# Altium footprint library 调理电路板.PcbLib: 25 footprints (part 2 of 2)
Each footprint in its own frame and in the unit in brackets; x right, y up, seen from the top. Pads: shape width x height; smd on the part's side, far side on the other; paste and mask are expansions set on the pad; w line width, h text height; cw(c..) or ccw(c..) is an arc to the next point about the centre after c.
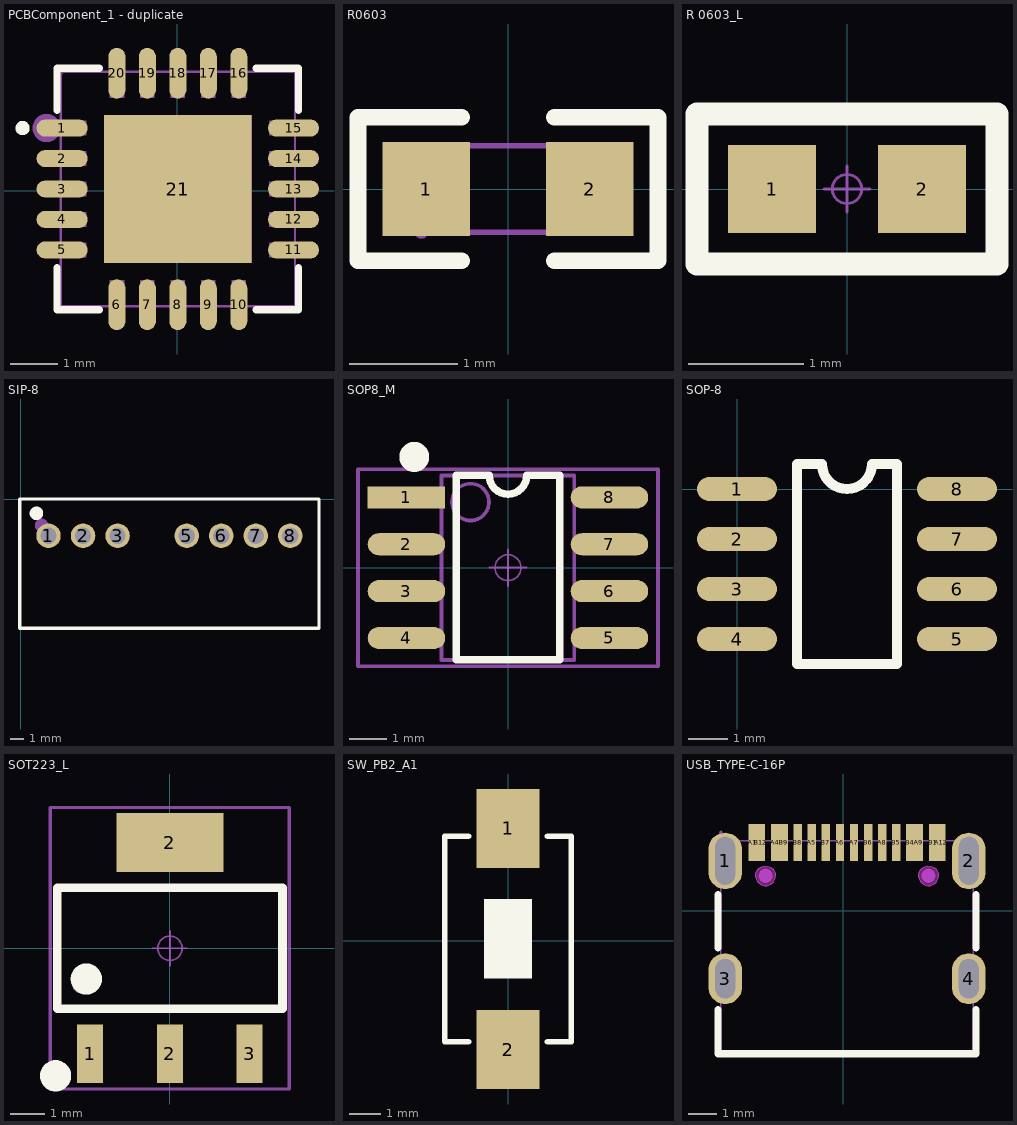
[diagram p1: the footprints below, top view; thin cyan lines are the x and y axes]

## PCBComponent_1 - duplicate [mil]
pads (21):
  oval 42.8x14.3 smd paste-3937 mask+2: 1(-96.6,52.7) 2(-96.6,27.1) 3(-96.6,1.5) 4(-96.6,-24.1) 5(-96.6,-49.7) 11(97.8,-49.7) 12(97.8,-24.1) 13(97.8,1.5) 14(97.8,27.1) 15(97.8,52.7)
  oval 14.3x42.8 smd paste-3937 mask+2: 6(-50.6,-95.7) 7(-25,-95.7) 8(0.6,-95.7) 9(26.2,-95.7) 10(51.8,-95.7) 16(51.8,98.7) 17(26.2,98.7) 18(0.6,98.7) 19(-25,98.7) 20(-50.6,98.7)
  rect 124x124 smd paste-3937 mask+2: 21(0.6,1.5)
Top Overlay:
  lines w6: -100.8,-64.3 -100.8,-99.9 -65.3,-99.9 ; -100.8,67.4 -100.8,102.9 -65.3,102.9 ; 66.4,-99.9 102,-99.9 102,-64.3 ; 66.4,102.9 102,102.9 102,67.4 ; -132.8,52.7 ccw(c-129.8,52.7) -126.8,52.7 ccw(c-129.8,52.7) -132.8,52.7
Top Paste:
  drawing of 21 lines, arcs and shapes, not listed
Mechanical 16:
  region: -49,63.5 62.6,63.5 62.6,-60.5 -61.4,-60.5 -61.4,51.1
  region: -56.6,78.3 -44.6,78.3 -44.6,99.9 -56.6,99.9
  region: -31,78.3 -19,78.3 -19,99.9 -31,99.9
  region: -5.4,78.3 6.6,78.3 6.6,99.9 -5.4,99.9
  region: 20.2,78.3 32.2,78.3 32.2,99.9 20.2,99.9
  region: 45.8,78.3 57.8,78.3 57.8,99.9 45.8,99.9
  region: 99,58.7 77.4,58.7 77.4,46.7 99,46.7
  region: 99,33.1 77.4,33.1 77.4,21.1 99,21.1
  region: 99,7.5 77.4,7.5 77.4,-4.5 99,-4.5
  region: 99,-18.1 77.4,-18.1 77.4,-30.1 99,-30.1
  region: 99,-43.7 77.4,-43.7 77.4,-55.7 99,-55.7
  region: 45.8,-75.3 57.8,-75.3 57.8,-96.9 45.8,-96.9
  region: 20.2,-75.3 32.2,-75.3 32.2,-96.9 20.2,-96.9
  region: -5.4,-75.3 6.6,-75.3 6.6,-96.9 -5.4,-96.9
  region: -31,-75.3 -19,-75.3 -19,-96.9 -31,-96.9
  region: -56.6,-75.3 -44.6,-75.3 -44.6,-96.9 -56.6,-96.9
  region: -97.8,-43.7 -76.2,-43.7 -76.2,-55.7 -97.8,-55.7
  region: -97.8,-18.1 -76.2,-18.1 -76.2,-30.1 -97.8,-30.1
  region: -97.8,7.5 -76.2,7.5 -76.2,-4.5 -97.8,-4.5
  region: -97.8,33.1 -76.2,33.1 -76.2,21.1 -97.8,21.1
  region: -97.8,58.7 -76.2,58.7 -76.2,46.7 -97.8,46.7
  region: -95.5,99.9 -95.5,99 -96.9,97.6 -98.8,97.6 -100.2,99 -100.2,99.9 -100.2,100.9 -98.8,102.3 -96.9,102.3 -95.5,100.9
  lines w2: -97.8,-96.9 -97.8,99.9 99,99.9 99,-96.9 -97.8,-96.9
  lines w11.8: -115.6,52.7 ccw(c-109.7,52.7) -103.8,52.7 ccw(c-109.7,52.7) -115.6,52.7

## R0603 [mil]
pads (2):
  rect 31.8x34 smd paste-3937 mask+2: 1(-29.7,0) 2(29.7,0)
Top Overlay:
  lines w6: -16.8,-26 -54.5,-26 -54.5,26 -16.8,26 ; 16.8,-26 54.5,-26 54.5,26 16.8,26
Top Paste:
  region: -47,-17.7 -15.6,-17.7 -13.6,-15.7 -13.6,-6.8 -28.2,-6.8 -28.2,6.2 -13.6,6.2 -13.6,15.7 -15.6,17.7 -47,17.7 -49,15.7 -49,-15.7
  region: 47,17.7 15.6,17.7 13.6,15.7 13.6,6.8 28.1,6.8 28.1,-6.2 13.6,-6.2 13.6,-15.7 15.6,-17.7 47,-17.7 49,-15.7 49,15.7
Mechanical 16:
  region: 31.5,-15.7 31.5,15.7 19.7,15.7 19.7,-15.7
  region: -31.5,-15.7 -31.5,15.7 -19.7,15.7 -19.7,-15.7
  region: -29.1,-15.8 -29.5,-17 -30.5,-17.9 -31.8,-18.1 -33,-17.5 -33.8,-16.4 -33.8,-15.1 -33,-14 -31.8,-13.4 -30.5,-13.6 -29.5,-14.5
  lines w2: -31.5,-15.7 31.5,-15.7 31.5,15.7 -31.5,15.7 -31.5,-15.7

## R 0603_L [mil]
pads (2):
  rect 30x30 smd: 1(-25.6,0) 2(25.6,0)
Top Overlay:
  lines w8: -51.2,-25.6 -51.2,25.6 51.2,25.6 51.2,-25.6 -51.2,-25.6
Mechanical 16:
  lines w1: -7.9,0 7.9,0 ; 0,-7.9 0,7.9 ; -5,0 ccw(c0,0) 5,0 ccw(c0,0) -5,0

## SIP-8 [mil]
pads (7):
  round 70.9 hole 47.2: 1(80.4,-104.9) 2(180.4,-104.9) 3(280.4,-104.9) 5(480.4,-104.9) 6(580.4,-104.9) 7(680.4,-104.9) 8(780.4,-104.9)
Top Overlay:
  lines w10: -2.7,-372.6 863.5,-372.6 863.5,1.4 -2.7,1.4 -2.7,-372.6
  lines w19.7: 35.6,-39.9 ccw(c45.4,-39.9) 55.2,-39.9 ccw(c45.4,-39.9) 35.6,-39.9
Mechanical 16:
  region: 766.6,-99 794.2,-99 794.2,-110.8 766.6,-110.8
  region: 666.6,-99 694.2,-99 694.2,-110.8 666.6,-110.8
  region: 566.6,-99 594.2,-99 594.2,-110.8 566.6,-110.8
  region: 466.6,-99 494.2,-99 494.2,-110.8 466.6,-110.8
  region: 266.6,-99 294.2,-99 294.2,-110.8 266.6,-110.8
  region: 166.6,-99 194.2,-99 194.2,-110.8 166.6,-110.8
  region: 66.6,-99 94.2,-99 94.2,-110.8 66.6,-110.8
  region: -0.3,-372.6 -0.3,-373.6 -1.7,-375 -3.6,-375 -5,-373.6 -5,-372.6 -5,-371.6 -3.6,-370.3 -1.7,-370.3 -0.3,-371.6
  lines w2: -2.7,-372.6 863.5,-372.6 863.5,1.4 -2.7,1.4 -2.7,-372.6
  lines w19.7: 50.6,-74.9 ccw(c60.4,-74.9) 70.2,-74.9 ccw(c60.4,-74.9) 50.6,-74.9

## SOP8_M [mil]
pads (8):
  rect 82.7x23.6 smd: 1(-108.3,75)
  oval 82.7x23.6 smd: 2(-108.3,25) 3(-108.3,-25) 4(-108.3,-75) 5(108.2,-75) 6(108.2,-25) 7(108.2,25) 8(108.2,75)
Top Overlay:
  lines w7.9: -55,98.4 -55,-98.4 55,-98.4 55,98.4
  lines w8: -55,98.4 -20,98.4 -19.6,94.5 -18.5,90.8 -16.7,87.3 -14.2,84.3 -11.1,81.8 -7.7,79.9 -3.9,78.8 0,78.4 3.9,78.8 7.6,79.9 11.1,81.8 14.1,84.3 16.6,87.3 18.4,90.8 19.6,94.5 20,98.4 55,98.4
  lines w19.7: -106.1,118.1 ccw(c-100,118.1) -93.9,118.1 ccw(c-100,118.1) -106.1,118.1
Mechanical 16:
  lines w2: -19.7,0 19.7,0 ; 0,-19.7 0,19.7 ; -13.8,0 ccw(c0,0) 13.8,0 ccw(c0,0) -13.8,0
  lines w3.9: -160,-105 -160,105 160,105 160,-105 -160,-105 ; -70.9,-98.4 -70.9,98.4 70.8,98.4 70.8,-98.4 -70.9,-98.4 ; -59.7,70 ccw(c-40,70) -20.3,70 ccw(c-40,70) -59.7,70

## SOP-8 [mil]
pads (8):
  oval 80x24 smd: 1(0,0) 2(0,-50) 3(0,-100) 4(0,-150) 5(220,-150) 6(220,-100) 7(220,-50) 8(220,0)
Top Overlay:
  lines w10: 60,-175 60,25 85,25 85.4,20.7 86.5,16.4 88.3,12.5 90.8,8.9 93.9,5.8 97.5,3.3 101.4,1.5 105.6,0.4 110,0 114.3,0.4 118.5,1.5 122.5,3.3 126,5.8 129.1,8.9 131.6,12.5 133.5,16.4 134.6,20.7 135,25 160,25 160,-175 60,-175

## SOT223_L [mil]
pads (4):
  rect 29.5x66.9 smd: 1(-90.6,-120) 2(0,-120) 3(90.6,-120)
  rect 122x66.9 smd: 2(0,120)
Top Overlay:
  lines w9.8: -128,-68.9 128,-68.9 128,68.9 -128,68.9 -128,-68.9
  lines w19.7: -137.9,-145 ccw(c-130,-145) -122.1,-145 ccw(c-130,-145) -137.9,-145 ; -102.9,-35 ccw(c-95,-35) -87.1,-35 ccw(c-95,-35) -102.9,-35
Mechanical 16:
  lines w2: -19.7,0 19.7,0 ; 0,-19.7 0,19.7 ; -13.8,0 ccw(c0,0) 13.8,0 ccw(c0,0) -13.8,0
  lines w3.9: -135.8,-160 135.8,-160 135.8,160 -135.8,160 -135.8,-160 ; -128,-68.9 128,-68.9 128,68.9 -128,68.9 -128,-68.9 ; -109.6,-40 ccw(c-99.8,-40) -90,-40 ccw(c-99.8,-40) -109.6,-40

## SW_PB2_A1 [mil]
pads (2):
  rect 78.7x98.4 smd: 1(0,140) 2(0,-135.6)
Top Overlay:
  region: 29.6,51.5 -29.4,51.5 -29.4,-46.9 29.6,-46.9
  lines w7: -49.2,-125.7 -78.7,-125.6 -78.7,130.2 -49.2,130.2 ; 49.2,-125.7 78.7,-125.7 78.7,130.2 49.2,130.2

## USB_TYPE-C-16P [mil]
pads (20):
  oval 47.2x78.7 hole 27.6 slot 66.9 at 90 deg paste-99999 mask+2: 1(-165.1,69.4) 2(175.1,69.4)
  oval 47.2x70.9 hole 27.6 slot 55.1 at 90 deg paste-99999 mask+2: 3(-165.1,-95.1) 4(175.1,-95.1)
  rect 11.8x51.2 smd paste-3937 mask+2: A1(-126.9,95) A4(-95.4,95) A5(-44.2,95) A6(-4.8,95) A7(14.8,95) A8(54.2,95) A9(105.4,95) A12(136.9,95) B1(125.1,95) B4(93.6,95) B5(73.9,95) B6(34.5,95) B7(-24.5,95) B8(-63.9,95) B9(-83.6,95) B12(-115.1,95)
Top Overlay:
  lines w10: -175,-138.1 -175,-200 185,-200 185,-138.1 ; -175,-52.1 -175,22.5 ; 185,-52.1 185,22.5
Top Paste:
  drawing of 16 lines, arcs and shapes, not listed
Keep-Out Layer:
  board cut-out: 132.6,48.6 132.2,45.4 131.1,42.4 129.3,39.7 127,37.5 124.2,35.9 121.2,35 118,34.8 114.8,35.4 111.9,36.6 109.3,38.6 107.3,41 105.8,43.9 105.1,47 105.1,50.2 105.8,53.3 107.3,56.2 109.3,58.6 111.9,60.5 114.8,61.8 118,62.3 121.2,62.2 124.2,61.2 127,59.6 129.3,57.4 131.1,54.8 132.2,51.8
  board cut-out: -95,48.6 -95.4,45.4 -96.5,42.4 -98.2,39.7 -100.6,37.5 -103.3,35.9 -106.4,35 -109.6,34.8 -112.7,35.4 -115.7,36.6 -118.2,38.6 -120.3,41 -121.7,43.9 -122.5,47 -122.5,50.2 -121.7,53.3 -120.3,56.2 -118.2,58.6 -115.7,60.5 -112.7,61.8 -109.6,62.3 -106.4,62.2 -103.3,61.2 -100.6,59.6 -98.2,57.4 -96.5,54.8 -95.4,51.8
Keep-Out Layer:
  drawing of 58 lines, arcs and shapes, not listed
Mechanical 1:
  lines w0.1: -122.5,47 -122.5,50.2 -121.7,53.3 -120.3,56.2 -118.2,58.6 -115.7,60.5 -112.7,61.8 -109.6,62.3 -106.4,62.2 -103.3,61.2 -100.6,59.6 -98.2,57.4 -96.5,54.8 -95.4,51.8 -95,48.6 -95.4,45.4 -96.5,42.4 -98.2,39.7 -100.6,37.5 -103.3,35.9 -106.4,35 -109.6,34.8 -112.7,35.4 -115.7,36.6 -118.2,38.6 -120.3,41 -121.7,43.9 -122.5,47 ; 105.1,47 105.1,50.2 105.8,53.3 107.3,56.2 109.3,58.6 111.9,60.5 114.8,61.8 118,62.3 121.2,62.2 124.2,61.2 127,59.6 129.3,57.4 131.1,54.8 132.2,51.8 132.6,48.6 132.2,45.4 131.1,42.4 129.3,39.7 127,37.5 124.2,35.9 121.2,35 118,34.8 114.8,35.4 111.9,36.6 109.3,38.6 107.3,41 105.8,43.9 105.1,47
Mechanical 16:
  region: 131,109 138.8,109 138.8,69.6 131,69.6
  region: 123.1,109 131,109 131,69.6 123.1,69.6
  region: 99.4,109 107.2,109 107.2,69.6 99.4,69.6
  region: 91.5,109 99.4,109 99.4,69.6 91.5,69.6
  region: -128.9,109 -121.1,109 -121.1,69.6 -128.9,69.6
  region: -121.1,109 -113.2,109 -113.2,69.6 -121.1,69.6
  region: -97.4,109 -89.6,109 -89.6,69.6 -97.4,69.6
  region: -89.6,109 -81.7,109 -81.7,69.6 -89.6,69.6
  region: -67.8,109 -60,109 -60,69.6 -67.8,69.6
  region: -48.1,109 -40.3,109 -40.3,69.6 -48.1,69.6
  region: -28.5,109 -20.6,109 -20.6,69.6 -28.5,69.6
  region: -8.8,109 -0.9,109 -0.9,69.6 -8.8,69.6
  region: 10.9,109 18.8,109 18.8,69.6 10.9,69.6
  region: 30.6,109 38.5,109 38.5,69.6 30.6,69.6
  region: 70,109 77.8,109 77.8,69.6 70,69.6
  region: 50.3,109 58.1,109 58.1,69.6 50.3,69.6
  region: 169.2,-79.4 181,-79.4 181,-110.9 169.2,-110.9
  region: -171,-79.4 -159.2,-79.4 -159.2,-110.9 -171,-110.9
  region: 169.2,91.1 181,91.1 181,47.8 169.2,47.8
  region: -171,91.1 -159.2,91.1 -159.2,47.8 -171,47.8
  region: -168.6,109 -169,107.7 -170,106.9 -171.3,106.7 -172.5,107.2 -173.3,108.3 -173.3,109.7 -172.5,110.8 -171.3,111.3 -170,111.2 -169,110.3
  lines w2: -171,-200 181,-200 181,97.2 -171,97.2 -171,-200
  lines w9.8: -113.7,48.6 -113.3,50.5 -112.3,52.1 -110.7,53.1 -108.8,53.5 -106.9,53.1 -105.3,52.1 -104.2,50.5 -103.9,48.6 -104.2,46.7 -105.3,45.1 -106.9,44 -108.8,43.7 -110.7,44 -112.3,45.1 -113.3,46.7 -113.7,48.6 ; 113.9,48.6 114.2,50.5 115.3,52.1 116.9,53.1 118.8,53.5 120.7,53.1 122.3,52.1 123.3,50.5 123.7,48.6 123.3,46.7 122.3,45.1 120.7,44 118.8,43.7 116.9,44 115.3,45.1 114.2,46.7 113.9,48.6